# Altium footprint library LM4041DYM3-1P2-TR.PcbLib: 3 footprints
Each footprint in its own frame and in the unit in brackets; x right, y up, seen from the top. Pads: shape width x height; smd on the part's side, far side on the other; paste and mask are expansions set on the pad; w line width, h text height; cw(c..) or ccw(c..) is an arc to the next point about the centre after c.
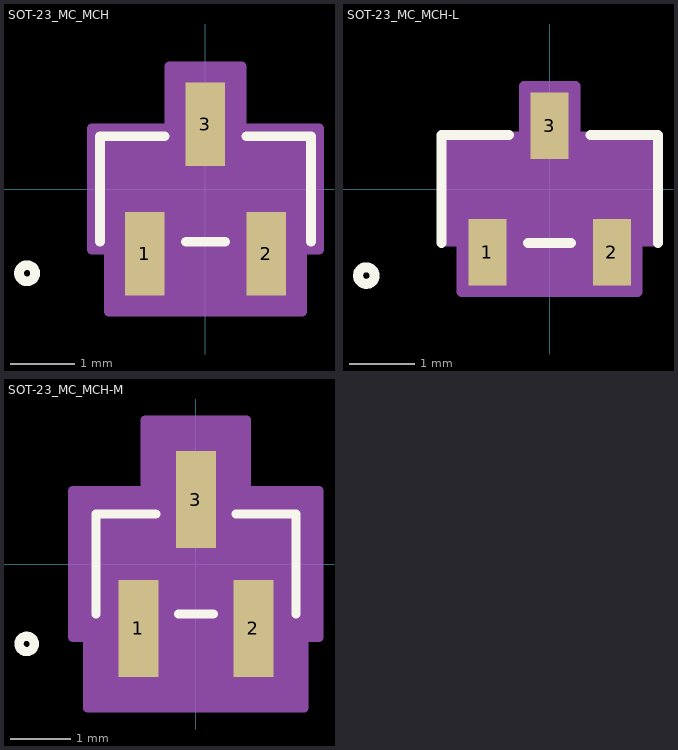
[diagram p0: the footprints below, top view; thin cyan lines are the x and y axes]

## SOT-23_MC_MCH [mm]
pads (3):
  rect 0.619x1.31 smd paste+0 mask+0: 1(-0.95,-1.015) 2(0.95,-1.015) 3(0,1.015)
Top Overlay:
  circle w0.152: c-2.795,-1.32 r0.127
  lines w0.152: -1.652,-0.827 -1.652,0.827 -0.642,0.827 ; -0.308,-0.827 0.308,-0.827 ; 0.642,0.827 1.652,0.827 1.652,-0.827
  text ".Designator" at -3.492,-0.635 h1.27
Mechanical 13:
  circle w0.025: c-1.271,-0.446 r0.127
  lines w0.025: -1.525,-0.7 1.525,-0.7 1.525,0.7 -1.525,0.7 -1.525,-0.7 ; -1.229,-1.32 -1.229,-0.7 -0.671,-0.7 -0.671,-1.32 -1.229,-1.32 ; -0.279,0.7 0.279,0.7 0.279,1.32 -0.279,1.32 -0.279,0.7 ; 0.671,-1.32 0.671,-0.7 1.229,-0.7 1.229,-1.32 0.671,-1.32
  text ".Designator" at -3.492,-0.635 h1.27
Mechanical 15:
  region: -1.779,-0.954 -1.779,0.954 -0.563,0.954 -0.563,1.924 0.563,1.924 0.563,0.954 1.779,0.954 1.779,-0.954 1.513,-0.954 1.513,-1.924 -1.513,-1.924 -1.513,-0.954
  region: 1.525,-0.7 -1.525,-0.7 -1.525,0.7 1.525,0.7
  lines w0.152: -1.779,-0.954 -1.779,0.954 -0.563,0.954 -0.563,1.924 0.563,1.924 0.563,0.954 1.779,0.954 1.779,-0.954 1.513,-0.954 1.513,-1.924 -1.513,-1.924 -1.513,-0.954 -1.779,-0.954
3D body "SOT-23_MC_MCH.step": height 1.12, standoff 0, extent -1.525,-1.32 1.525,1.32

## SOT-23_MC_MCH-L [mil]
pads (3):
  rect 22.79x39.75 smd paste+0 mask+0: 1(-37.4,-38) 2(37.4,-38) 3(0,38)
Top Overlay:
  circle w6: c-110.04,-51.97 r5
  lines w6: -65.04,-32.56 -65.04,32.56 -24.49,32.56 ; -12.91,-32.56 12.91,-32.56 ; 24.49,32.56 65.04,32.56 65.04,-32.56
  text ".Designator" at -137.5,-25 h50
Mechanical 13:
  circle w1: c-50.04,-17.56 r5
  lines w1: -60.04,-27.56 60.04,-27.56 60.04,27.56 -60.04,27.56 -60.04,-27.56 ; -48.4,-51.97 -48.4,-27.56 -26.4,-27.56 -26.4,-51.97 -48.4,-51.97 ; -11,27.56 11,27.56 11,51.97 -11,51.97 -11,27.56 ; 26.4,-51.97 26.4,-27.56 48.4,-27.56 48.4,-51.97 26.4,-51.97
  text ".Designator" at -137.5,-25 h50
Mechanical 15:
  region: -64.04,-31.56 -64.04,31.56 -15.39,31.56 -15.39,61.87 15.39,61.87 15.39,31.56 64.04,31.56 64.04,-31.56 52.8,-31.56 52.8,-61.87 -52.8,-61.87 -52.8,-31.56
  region: 60.04,-27.56 -60.04,-27.56 -60.04,27.56 60.04,27.56
  lines w6: -64.04,-31.56 -64.04,31.56 -15.39,31.56 -15.39,61.87 15.39,61.87 15.39,31.56 64.04,31.56 64.04,-31.56 52.8,-31.56 52.8,-61.87 -52.8,-61.87 -52.8,-31.56 -64.04,-31.56
3D body "SOT-23_MC_MCH.step": height 44.17, standoff 0, extent -60.04,-51.97 60.04,51.97

## SOT-23_MC_MCH-M [mm]
pads (3):
  rect 0.659x1.61 smd paste+0 mask+0: 1(-0.95,-1.065) 2(0.95,-1.065) 3(0,1.065)
Top Overlay:
  circle w0.152: c-2.795,-1.32 r0.127
  lines w0.152: -1.652,-0.827 -1.652,0.827 -0.662,0.827 ; -0.288,-0.827 0.288,-0.827 ; 0.662,0.827 1.652,0.827 1.652,-0.827
  text ".Designator" at -3.492,-0.635 h1.27
Mechanical 13:
  circle w0.025: c-1.271,-0.446 r0.127
  lines w0.025: -1.525,-0.7 1.525,-0.7 1.525,0.7 -1.525,0.7 -1.525,-0.7 ; -1.229,-1.32 -1.229,-0.7 -0.671,-0.7 -0.671,-1.32 -1.229,-1.32 ; -0.279,0.7 0.279,0.7 0.279,1.32 -0.279,1.32 -0.279,0.7 ; 0.671,-1.32 0.671,-0.7 1.229,-0.7 1.229,-1.32 0.671,-1.32
  text ".Designator" at -3.492,-0.635 h1.27
Mechanical 15:
  region: -2.033,-1.208 -2.033,1.208 -0.837,1.208 -0.837,2.378 0.837,2.378 0.837,1.208 2.033,1.208 2.033,-1.208 1.787,-1.208 1.787,-2.378 -1.787,-2.378 -1.787,-1.208
  region: 1.525,-0.7 -1.525,-0.7 -1.525,0.7 1.525,0.7
  lines w0.152: -2.033,-1.208 -2.033,1.208 -0.837,1.208 -0.837,2.378 0.837,2.378 0.837,1.208 2.033,1.208 2.033,-1.208 1.787,-1.208 1.787,-2.378 -1.787,-2.378 -1.787,-1.208 -2.033,-1.208
3D body "SOT-23_MC_MCH.step": height 1.12, standoff 0, extent -1.525,-1.32 1.525,1.32